# Altium schematic symbol library HEADER.SchLib: 13 symbols
Pins are listed as number, name and electrical type; pins without a type are passive.

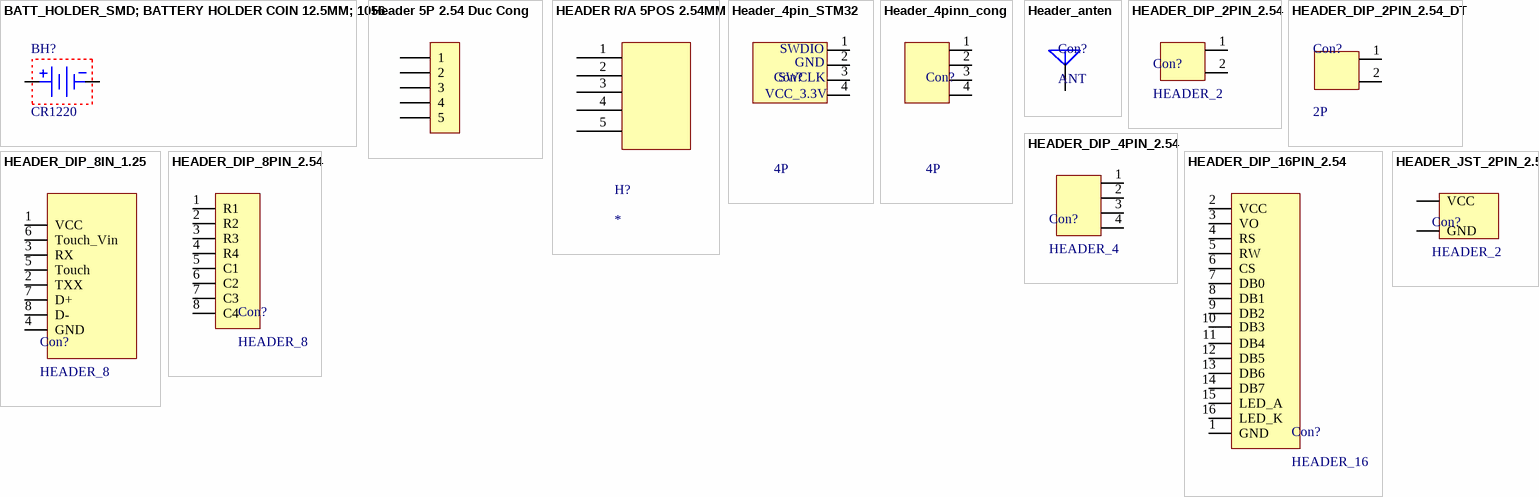
[diagram p0: symbols BATT_HOLDER_SMD; BATTERY HOLDER COIN 12.5MM; 1056 to HEADER_JST_2PIN_2.5]

## BATT_HOLDER_SMD; BATTERY HOLDER COIN 12.5MM; 1056
designator BH?, comment CR1220
Battery Holder, SMT, 1 Coin Cell, 12mm, Plastic, UL94V-0 | Keystone Electronics 1056; Manufacturer Part Number: 1056; Number of Batteries: 1; LIBRARY MADE BY: MR. XUAN SIEU; Supplier 1: DigiKey; Manufacturer: Keystone; RoHS: Compliant; Category: Batteries and Accessories; Stock 1: 79944; Pricing 1: 1=1.1, 1000=0.41, 2500=0.38, 5000=0.35 (USD); Color: Black; Lead Free: Lead Free; Lifecycle Status: Production; Max Operating Temperature: 145°C; Min Operating Temperature: -50°C; Mount: PCB, Surface Mount; Number of Cells: 1; REACH SVHC: Yes; Termination: SMD/SMT; ComponentLink1URL: https://datasheet.octopart.com:443/1056-Keystone-datasheet-15715033.pdf?src-supplier=Future+Electronics; ComponentLink1Description: https://datasheet.octopart.com:443/1056-Keystone-datasheet-15715033.pdf?src-supplier=Future+Electronics; ComponentLink2URL: https://datasheet.octopart.com:443/1056-Keystone-datasheet-8326175.pdf?src-supplier=Future+Electronics; ComponentLink2Description: https://datasheet.octopart.com:443/1056-Keystone-datasheet-8326175.pdf?src-supplier=Future+Electronics; ComponentLink3URL: https://datasheet.octopart.com:443/1056-Keystone-datasheet-137916583.pdf?src-supplier=LKR; ComponentLink3Description: https://datasheet.octopart.com:443/1056-Keystone-datasheet-137916583.pdf?src-supplier=LKR; ComponentLink4URL: https://datasheet.octopart.com:443/1056-Keystone-datasheet-137320296.pdf?src-supplier=Sager+Electronics; ComponentLink4Description: https://datasheet.octopart.com:443/1056-Keystone-datasheet-137320296.pdf?src-supplier=Sager+Electronics; ComponentLink5URL: https://datasheet.octopart.com:443/1056-Keystone-datasheet-62112666.pdf?src-supplier=RS+(Formerly+Allied+Electronics); ComponentLink5Description: https://datasheet.octopart.com:443/1056-Keystone-datasheet-62112666.pdf?src-supplier=RS+(Formerly+Allied+Electronics); ComponentLink6URL: https://datasheet.octopart.com:443/1056-Keystone-datasheet-21202752.pdf?src-supplier=Newark; ComponentLink6Description: https://datasheet.octopart.com:443/1056-Keystone-datasheet-21202752.pdf?src-supplier=Newark; ComponentLink7URL: https://datasheet.octopart.com:443/1056-Keystone-datasheet-17577351.pdf?src-supplier=TME; ComponentLink7Description: https://datasheet.octopart.com:443/1056-Keystone-datasheet-17577351.pdf?src-supplier=TME; ComponentLink8URL: https://datasheet.octopart.com:443/1056-Keystone-datasheet-176783336.pdf?src-supplier=SOS+electronic; ComponentLink8Description: https://datasheet.octopart.com:443/1056-Keystone-datasheet-176783336.pdf?src-supplier=SOS+electronic; Supplier Part Number 1: 36-1056-ND; LINK VIET NAM: https://linhkien.cxtvn.com/1651-de-pin-cr1220-3v-han-dan.html; LINK ORIGINAL: https://www.digikey.com/en/products/detail/keystone-electronics/1056/2020198
footprint BATT_HOLDER_COIL12.5MM
pins: 1 POS, 2 NEG

## Header 5P 2.54 Duc Cong
designator H?
Header 5P XH2.54-5P Đực Cong, MH001308, Cắm; Designer: kata; Link Vietnam: https://linhkienchatluong.vn/urlheader-xh254-chan-duc-cong/header-duc-5p-xh254-5p-chan-cong-10-chiec_sp1782_ct1705.aspx; Link origin: https://www.snapeda.com/parts/S5B-XH-A-LFSN/JST/view-part/?ref=search&t=header%20XH%205p; Datasheet: *
footprint Header 5P DC 2.54
pins: 1, 2, 3, 4, 5

## HEADER R/A 5POS 2.54MM
designator H?
CONN HEADER R/A 5POS 2.54MM; Designer: kata; Link Vietnam: https://linhkienchatluong.vn/urlheader-xh254-chan-duc-cong/header-duc-5p-xh254-5p-chan-cong-10-chiec_sp1782_ct1705.aspx; Link origin: https://www.digikey.vn/en/products/detail/jst-sales-america-inc/S5B-XH-A/1651040; Datasheet: https://www.jst-mfg.com/product/pdf/eng/eXH.pdf
footprint HEADER R/A 5POS 2.54MM (SHEADER R/A 5POS 2.54MM)
pins: 1, 2, 3, 4, 5

## Header_4pin_STM32
designator Con?, comment 4P
Connector Header Through Hole 4 position 0.098" (2.54mm), R/A; Manufacturer Cross: JST; Manufacturer Part Number: B4B-XH-A; Current Rating: 3A; Contact Resistance: 10mR; Insulation Resistance: 1GR; LIBRARY MADE BY: MR. XUAN SIEU; Supplier 1: Digikey; RoHS: Yes; Category: FFC / FPC; Stock 1: 172382; Pricing 1: 1=0.17, 10=0.149, 100=0.1262, 500=0.1126, 1000=0.10721, 5000=0.09569, 10000=0.09112 (USD); Number of Pins: 4; Contact Material: Bronze,Tin; Housing Material: Nylon; Orientation: Straight; Series: XH; ComponentLink1URL: https://datasheet.ciiva.com/14155/xh-series-eng-tds-14155433.pdf?src-supplier=Distrelec; ComponentLink1Description: https://datasheet.ciiva.com/14155/xh-series-eng-tds-14155433.pdf?src-supplier=Distrelec; ComponentLink2Description: Link Original; ComponentLink2URL: https://www.digikey.com/en/products/detail/jst-sales-america-inc/B4B-XH-A/1651047; ComponentLink3Description: Link Cross; ComponentLink3URL: https://www.lcsc.com/product-detail/Wire-To-Board-Connector_JST-B4B-XH-A-G_C594232.html?s_z=n_B4B-XH-A; ComponentLink4Description: Link Viet Nam; ComponentLink4URL: https://linhkien.cxtvn.com/1789-header-duc-254-chan-thang.html; Supplier Part Number 1: 455-B4B-XH-A-ND
footprint HEADER 4P R/A 2.54MM
pins: 1, 2, 3, 4
text: SWDIO; GND; SWCLK; VCC_3.3V

## Header_4pinn_cong
designator Con?, comment 4P
Connector Header Through Hole 4 position 0.098" (2.54mm), R/A; Manufacturer Cross: JST; Manufacturer Part Number: B4B-XH-A; Current Rating: 3A; Contact Resistance: 10mR; Insulation Resistance: 1GR; LIBRARY MADE BY: MR. XUAN SIEU; Supplier 1: Digikey; RoHS: Yes; Category: FFC / FPC; Stock 1: 172382; Pricing 1: 1=0.17, 10=0.149, 100=0.1262, 500=0.1126, 1000=0.10721, 5000=0.09569, 10000=0.09112 (USD); Number of Pins: 4; Contact Material: Bronze,Tin; Housing Material: Nylon; Orientation: Straight; Series: XH; ComponentLink1URL: https://datasheet.ciiva.com/14155/xh-series-eng-tds-14155433.pdf?src-supplier=Distrelec; ComponentLink1Description: https://datasheet.ciiva.com/14155/xh-series-eng-tds-14155433.pdf?src-supplier=Distrelec; ComponentLink2Description: Link Original; ComponentLink2URL: https://www.digikey.com/en/products/detail/jst-sales-america-inc/B4B-XH-A/1651047; ComponentLink3Description: Link Cross; ComponentLink3URL: https://www.lcsc.com/product-detail/Wire-To-Board-Connector_JST-B4B-XH-A-G_C594232.html?s_z=n_B4B-XH-A; ComponentLink4Description: Link Viet Nam; ComponentLink4URL: https://linhkien.cxtvn.com/1789-header-duc-254-chan-thang.html; Supplier Part Number 1: 455-B4B-XH-A-ND
footprint HEADER 4P R/A 2.54MM
pins: 1, 2, 3, 4

## Header_anten
designator Con?, comment ANT
RF / Coaxial Connector, UMCC Coaxial, Straight Jack, Surface Mount Straight, 50 Ohm; Manufacturer: TE Connectivity; Manufacturer Part Number: CONMHF1-SMD-G-T; Manufacturer Lifecycle Status: ACTIVE; Dielectric Material: Liquid Crystal Polymer; Frequency: 6GHz; Gender: Male; Impedance: 50Ω; Insertion Loss (dB): 0.184dB; Number of Positions: 1; MADE BY: HOANGBEU; Supplier: DigiKey; Supplier Part Number: 343-CONMHF1-SMD-G-TTR-ND; RoHS: Compliant; Category: RF / Coaxial Connectors; Stock: 103500; Pricing: 4500=0.3388 (USD); China RoHS: Non-Compliant; Export Control Classification Number (ECCN) Code: EAR99; Fastening Type: Snap; Harmonized Tariff Schedule (HTS) Code: 8536.69.40.10; Introduction Date: 2024-03-20; Lifecycle Status: Production; Max Operating Temperature: 90°C; Min Operating Temperature: -40°C; Orientation: Straight; REACH SVHC: No; ComponentLink1URL: https://datasheet.octopart.com:443/CONMHF1-SMD-G-T-TE-Connectivity-datasheet-175778999.pdf?src-supplier=TE+Connectivity; ComponentLink1Description: https://datasheet.octopart.com:443/CONMHF1-SMD-G-T-TE-Connectivity-datasheet-175778999.pdf?src-supplier=TE+Connectivity; ComponentLink2URL: https://datasheet.octopart.com:443/CONMHF1-SMD-G-T-TE-Connectivity-datasheet-175778996.pdf?src-supplier=TE+Connectivity; ComponentLink2Description: https://datasheet.octopart.com:443/CONMHF1-SMD-G-T-TE-Connectivity-datasheet-175778996.pdf?src-supplier=TE+Connectivity; ComponentLink3URL: https://datasheet.octopart.com:443/CONMHF1-SMD-G-T-TE-Connectivity-datasheet-175778997.pdf?src-supplier=Master+Electronics; ComponentLink3Description: https://datasheet.octopart.com:443/CONMHF1-SMD-G-T-TE-Connectivity-datasheet-175778997.pdf?src-supplier=Master+Electronics; ComponentLink4URL: https://datasheet.octopart.com:443/CONMHF1-SMD-G-T-TE-Connectivity-datasheet-170590134.pdf?src-supplier=Master+Electronics; ComponentLink4Description: https://datasheet.octopart.com:443/CONMHF1-SMD-G-T-TE-Connectivity-datasheet-170590134.pdf?src-supplier=Master+Electronics; ComponentLink5URL: https://datasheet.octopart.com:443/CONMHF1-SMD-G-T-TE-Connectivity---Linx-Technologies-datasheet-178205583.pdf?src-supplier=Master+Electronics; ComponentLink5Description: https://datasheet.octopart.com:443/CONMHF1-SMD-G-T-TE-Connectivity---Linx-Technologies-datasheet-178205583.pdf?src-supplier=Master+Electronics; ComponentLink6URL: https://sigma.octopart.com:443/170590136/technical_drawing/TE-Connectivity-CONMHF1-SMD-G-T.pdf?src-supplier=Future+Electronics; ComponentLink6Description: https://sigma.octopart.com:443/170590136/technical_drawing/TE-Connectivity-CONMHF1-SMD-G-T.pdf?src-supplier=Future+Electronics; ComponentLink7URL: https://datasheet.octopart.com:443/CONMHF1-SMD-G-T-TE-Connectivity-datasheet-179174489.pdf?src-supplier=ODG+(Origin+Data+Global); ComponentLink7Description: https://datasheet.octopart.com:443/CONMHF1-SMD-G-T-TE-Connectivity-datasheet-179174489.pdf?src-supplier=ODG+(Origin+Data+Global); ComponentLink8URL: https://datasheet.octopart.com:443/CONMHF1-SMD-G-T-Linx-Technologies-datasheet-159768554.pdf?src-supplier=TME; ComponentLink8Description: https://datasheet.octopart.com:443/CONMHF1-SMD-G-T-Linx-Technologies-datasheet-159768554.pdf?src-supplier=TME; LINK SP: https://www.digikey.vn/en/products/detail/te-connectivity-linx/CONMHF1-SMD-G-T/15293380?s=N4IgTCBcDaIMIHkByBZAEgMQIwFoDKKAIjgOI4AqIAugL5A; LINK MUA: https://linhkien.cxtvn.com/1647-kk23011-32-7h-de-anten-ipexipx-ufl-r-smt-smd-5c.html
footprint HEADER_ANTEN
pins: 1

## HEADER_DIP_2PIN_2.54
designator Con?, comment HEADER_2
CONN HEADER VERT 2POS 2.54MM / Connector Header Through Hole 2 position 0.100" (2.54mm); Manufacturer: Harwin; Manufacturer Part Number: M20-9990246; Connector Type: Male Pin; Contact Resistance: 30mΩ; Current Rating: 3A; Dielectric Material: Polyamide; Gender: Male; Insulation Resistance: 1GΩ; Number of Contacts: 2; Voltage Rating (AC): 750V; MADE BY: HOANGBEU; Supplier: DigiKey; Supplier Part Number: 952-2262-ND; RoHS: Compliant; Category: Headers and Wire Housings; Stock: 198991; Pricing: 1=0.1, 10=0.079, 100=0.0669, 500=0.0597, 1000=0.05684, 5000=0.05073, 10000=0.04831 (USD); Case/Package: SIL; Color: Black; Contact Material: Brass; Contact Mating Length: 6.096mm; Contact Plating: Tin; Country of Origin: Mainland China; Depth: 2.54mm; Export Control Classification Number (ECCN) Code: EAR99; Height: 8.99mm; Housing Color: Black; Housing Material: Nylon; Harmonized Tariff Schedule (HTS) Code: 8536.69.40.40; Insulation Color: Black; Introduction Date: 2005-06-27; Lead Pitch: 2.54mm; Length: 5.08mm; Lifecycle Status: Production; Max Current Rating: 3A; Max Operating Temperature: 105°C; Min Operating Temperature: -40°C; Mounting Technology: Through Hole; Pins: 2; Number of Positions: 2; Number of Rows: 1; Orientation: Straight; Packaging: Bulk; Pitch: 2.54mm; Radiation Hardening: No; REACH SVHC: Yes; Terminal Pitch: 2.54mm; Termination: Solder; ComponentLink1URL: https://datasheet.octopart.com:443/M20-9990246-Harwin-datasheet-169407857.pdf?src-supplier=Newark; ComponentLink1Description: https://datasheet.octopart.com:443/M20-9990246-Harwin-datasheet-169407857.pdf?src-supplier=Newark; ComponentLink2URL: https://datasheet.octopart.com:443/M20-9990246-Harwin-datasheet-27378916.pdf?src-supplier=Newark; ComponentLink2Description: https://datasheet.octopart.com:443/M20-9990246-Harwin-datasheet-27378916.pdf?src-supplier=Newark; ComponentLink3URL: https://datasheet.octopart.com:443/M20-9990246-Harwin-datasheet-96624206.pdf?src-supplier=element14+APAC; ComponentLink3Description: https://datasheet.octopart.com:443/M20-9990246-Harwin-datasheet-96624206.pdf?src-supplier=element14+APAC; ComponentLink4URL: https://datasheet.octopart.com:443/M20-9990246-Harwin-datasheet-32864541.pdf?src-supplier=Farnell; ComponentLink4Description: https://datasheet.octopart.com:443/M20-9990246-Harwin-datasheet-32864541.pdf?src-supplier=Farnell; ComponentLink5URL: https://datasheet.octopart.com:443/M20-9990246-Harwin-datasheet-7538443.pdf?src-supplier=Farnell; ComponentLink5Description: https://datasheet.octopart.com:443/M20-9990246-Harwin-datasheet-7538443.pdf?src-supplier=Farnell; ComponentLink6URL: https://datasheet.octopart.com:443/M20-9990246-Harwin-datasheet-508868.pdf?src-supplier=Farnell; ComponentLink6Description: https://datasheet.octopart.com:443/M20-9990246-Harwin-datasheet-508868.pdf?src-supplier=Farnell; LINK SP: https://www.digikey.vn/en/products/detail/harwin-inc/M20-9990246/3728226; LINK MUA: https://linhkien.cxtvn.com/5750-0022232021-conn-header-vert-2pos-254mm.html
footprint HEADER_DEIP, 2PIN_2.54 (M20-9990246)
pins: 1, 2

## HEADER_DIP_2PIN_2.54_DT
designator Con?, comment 2P
2.54mm
footprint 2P-2.54mm-DT
pins: 1, 2

## HEADER_DIP_4PIN_2.54
designator Con?, comment HEADER_4
Header, 2.54Mm, Pin, Tht, Vertical, 4Way; |Würth Elektronik 61300411121; Manufacturer: Wurth Elektronik; Manufacturer Lifecycle Status: ACTIVE; Connector Type: Male Pin; Contact Resistance: 20mΩ; Current Rating: 3A; Gender: Male; Insulation Resistance: 1GΩ; Number of Contacts: 4; Operating Supply Voltage: 250V; YEOL: 1 = Estimated lifetime > 10 years; MADE BY: HOANGBEU; Supplier: DigiKey; Supplier Part Number: 732-5317-ND; Manufacturer Part Number: 61300411121; RoHS: Compliant; Category: Headers and Wire Housings; Stock: 108620; Pricing: 1=0.19, 10=0.163, 25=0.1352, 50=0.113, 100=0.102, 1000=0.0986 (USD); Color: Black; Contact Material: Gold; Contact Mating Length: 5.9944mm; Contact Plating: Gold; Height: 8.89mm; Lead Free: Lead Free; Lead Pitch: 2.54mm; Length: 10.16mm; Lifecycle Status: Production; Max Operating Temperature: 105°C; Min Operating Temperature: -40°C; Mounting Technology: Through Hole; Pins: 4; Number of Positions: 4; Number of Rows: 1; Orientation: Vertical; Packaging: Bulk; Pitch: 2.54mm; Termination: Solder; Voltage Rating: 250V; ComponentLink1URL: https://datasheet.octopart.com:443/61300411121-W%C3%BCrth-Elektronik-datasheet-44382959.pdf?src-supplier=Future+Electronics; ComponentLink1Description: https://datasheet.octopart.com:443/61300411121-W%C3%BCrth-Elektronik-datasheet-44382959.pdf?src-supplier=Future+Electronics; ComponentLink2URL: https://datasheet.octopart.com:443/61300411121-Wurth-Elektronik-datasheet-169474491.pdf?src-supplier=Wurth+Elektronik; ComponentLink2Description: https://datasheet.octopart.com:443/61300411121-Wurth-Elektronik-datasheet-169474491.pdf?src-supplier=Wurth+Elektronik; ComponentLink3URL: https://datasheet.octopart.com:443/61300411121-W%C3%BCrth-Elektronik-datasheet-149524049.pdf?src-supplier=Farnell; ComponentLink3Description: https://datasheet.octopart.com:443/61300411121-W%C3%BCrth-Elektronik-datasheet-149524049.pdf?src-supplier=Farnell; ComponentLink4URL: https://datasheet.octopart.com:443/61300411121-W%C3%BCrth-Elektronik-datasheet-21154836.pdf?src-supplier=element14+APAC; ComponentLink4Description: https://datasheet.octopart.com:443/61300411121-W%C3%BCrth-Elektronik-datasheet-21154836.pdf?src-supplier=element14+APAC; LINK SP: https://www.digikey.vn/en/products/detail/w%C3%BCrth-elektronik/61300411121/4846827; LINK MUA: https://linhkien.cxtvn.com/11072-conn-header-vert-254mm.html
footprint HEADER_DIP_4PIN_2.54
pins: 1, 2, 3, 4

## HEADER_DIP_8IN_1.25
designator Con?, comment HEADER_8
Conn Shrouded Header (4 Sides) HDR 8 POS 1.25mm Solder ST Top Entry Thru-Hole PicoBlade Tray; Manufacturer: Molex; Manufacturer Part Number: 53047-0810; Manufacturer Lifecycle Status: ACTIVE; Contact Resistance: 20mΩ; Current Rating: 1A; Dielectric Material: Polyamide; Gender: Male; Glow Wire Compliant: Non-compliant; Insulation Resistance: 100MΩ; Number of Circuits: 7; Number of Contacts: 8; Pitch: 1.2446mm; Plating: Tin; Voltage Rating: 125V; MADE BY: HOANGBEU; Supplier: DigiKey; Supplier Part Number: WM1737-ND; RoHS: Compliant; Category: Headers and Wire Housings; Stock: 23793; Pricing: 1=0.49, 10=0.412, 100=0.35, 500=0.31236, 2000=0.28324, 6000=0.26211, 10000=0.25283 (USD); Case/Package: 0810; China RoHS: Compliant; Color: Natural; Contact Material: Tin; Contact Plating: Tin; Country of Origin: MX; Export Control Classification Number (ECCN) Code: EAR99; Flammability Rating: UL94 V-0; Height: 4.4mm; Housing Color: Natural; Housing Material: Polyamide; Harmonized Tariff Schedule (HTS) Code: 8536.69.40.40; Insulation Color: White; Introduction Date: 1994-12-01; Lead Free: Lead Free; Lead Pitch: 1.25mm; Lifecycle Status: Production; Max Operating Temperature: 85°C; Min Operating Temperature: -40°C; Mounting Technology: Through Hole; Pins: 8; Number of Positions: 8; Number of Rows: 1; Orientation: Vertical; Radiation Hardening: No; REACH SVHC: Yes; Schedule B: 8536694040, 8536694040|8536694040|8536694040|8536694040|8536694040; Terminal Pitch: 1.25mm; Termination: Solder; Voltage Rating (AC): 125V; Voltage Rating (DC): 125V; ComponentLink1URL: https://datasheet.octopart.com:443/53047-0810-Molex-datasheet-138898128.pdf?src-supplier=Sager+Electronics; ComponentLink1Description: https://datasheet.octopart.com:443/53047-0810-Molex-datasheet-138898128.pdf?src-supplier=Sager+Electronics; ComponentLink2URL: https://datasheet.octopart.com:443/53047-0810-Molex-datasheet-13785974.pdf?src-supplier=Sager+Electronics; ComponentLink2Description: https://datasheet.octopart.com:443/53047-0810-Molex-datasheet-13785974.pdf?src-supplier=Sager+Electronics; ComponentLink3URL: https://sigma.octopart.com:443/138898116/technical_drawing/Molex-53047-0810.pdf?src-supplier=IHS; ComponentLink3Description: https://sigma.octopart.com:443/138898116/technical_drawing/Molex-53047-0810.pdf?src-supplier=IHS; ComponentLink4URL: https://datasheet.octopart.com:443/530470810-Molex-datasheet-8334299.pdf?src-supplier=Molex; ComponentLink4Description: https://datasheet.octopart.com:443/530470810-Molex-datasheet-8334299.pdf?src-supplier=Molex; ComponentLink5URL: https://datasheet.octopart.com:443/53047-0810-Molex-datasheet-38191.pdf?src-supplier=TME; ComponentLink5Description: https://datasheet.octopart.com:443/53047-0810-Molex-datasheet-38191.pdf?src-supplier=TME; ComponentLink6URL: https://datasheet.octopart.com:443/53047-0810-Molex-datasheet-154755961.pdf?src-supplier=Master+Electronics; ComponentLink6Description: https://datasheet.octopart.com:443/53047-0810-Molex-datasheet-154755961.pdf?src-supplier=Master+Electronics; ComponentLink7URL: https://datasheet.octopart.com:443/53047-0810-Molex-datasheet-101583379.pdf?src-supplier=Farnell; ComponentLink7Description: https://datasheet.octopart.com:443/53047-0810-Molex-datasheet-101583379.pdf?src-supplier=Farnell; ComponentLink8URL: https://datasheet.octopart.com:443/53047-0810-Molex-datasheet-14711287.pdf?src-supplier=Farnell; ComponentLink8Description: https://datasheet.octopart.com:443/53047-0810-Molex-datasheet-14711287.pdf?src-supplier=Farnell; ComponentLink9URL: https://datasheet.octopart.com:443/53047-0810-Molex-datasheet-5313088.pdf?src-supplier=Farnell; ComponentLink9Description: https://datasheet.octopart.com:443/53047-0810-Molex-datasheet-5313088.pdf?src-supplier=Farnell; ComponentLink10URL: https://datasheet.octopart.com:443/53047-0810-Molex-datasheet-33003857.pdf?src-supplier=Electro+Sonic; ComponentLink10Description: https://datasheet.octopart.com:443/53047-0810-Molex-datasheet-33003857.pdf?src-supplier=Electro+Sonic; ComponentLink11URL: https://datasheet.octopart.com:443/53047-0810-Molex-datasheet-62105410.pdf?src-supplier=Electro+Sonic; ComponentLink11Description: https://datasheet.octopart.com:443/53047-0810-Molex-datasheet-62105410.pdf?src-supplier=Electro+Sonic; ComponentLink12URL: https://datasheet.octopart.com:443/53047-0810-Molex-datasheet-23710544.pdf?src-supplier=Electro+Sonic; ComponentLink12Description: https://datasheet.octopart.com:443/53047-0810-Molex-datasheet-23710544.pdf?src-supplier=Electro+Sonic; ComponentLink13URL: https://datasheet.octopart.com:443/53047-0810-Molex-datasheet-140186535.pdf?src-supplier=RS+(Formerly+Allied+Electronics); ComponentLink13Description: https://datasheet.octopart.com:443/53047-0810-Molex-datasheet-140186535.pdf?src-supplier=RS+(Formerly+Allied+Electronics); ComponentLink14URL: https://datasheet.octopart.com:443/53047-0810-Molex-datasheet-120153815.pdf?src-supplier=RS+(Formerly+Allied+Electronics); ComponentLink14Description: https://datasheet.octopart.com:443/53047-0810-Molex-datasheet-120153815.pdf?src-supplier=RS+(Formerly+Allied+Electronics); ComponentLink15URL: https://datasheet.octopart.com:443/530470810-Molex-datasheet-137316104.pdf?src-supplier=Future+Electronics; ComponentLink15Description: https://datasheet.octopart.com:443/530470810-Molex-datasheet-137316104.pdf?src-supplier=Future+Electronics; ComponentLink16URL: https://datasheet.octopart.com:443/53047-0810-Molex-datasheet-33003856.pdf?src-supplier=Newark; ComponentLink16Description: https://datasheet.octopart.com:443/53047-0810-Molex-datasheet-33003856.pdf?src-supplier=Newark; ComponentLink17URL: https://datasheet.octopart.com:443/53047-0810-Molex-datasheet-21208624.pdf?src-supplier=Newark; ComponentLink17Description: https://datasheet.octopart.com:443/53047-0810-Molex-datasheet-21208624.pdf?src-supplier=Newark; ComponentLink18URL: https://datasheet.octopart.com:443/53047-0810-Molex-datasheet-17741837.pdf?src-supplier=Jameco+(USA); ComponentLink18Description: https://datasheet.octopart.com:443/53047-0810-Molex-datasheet-17741837.pdf?src-supplier=Jameco+(USA); ComponentLink19URL: https://datasheet.octopart.com:443/53047-0810-Molex-datasheet-144844.pdf?src-supplier=DigiKey; ComponentLink19Description: https://datasheet.octopart.com:443/53047-0810-Molex-datasheet-144844.pdf?src-supplier=DigiKey; ComponentLink20URL: https://datasheet.octopart.com:443/53047-0810-Molex-datasheet-100429.pdf?src-supplier=Mouser; ComponentLink20Description: https://datasheet.octopart.com:443/53047-0810-Molex-datasheet-100429.pdf?src-supplier=Mouser; ComponentLink21URL: http://sigma.octopart.com:80/16412934/rohs_statement/Molex-53047-0810.pdf?src-supplier=Compliance+Statements; ComponentLink21Description: http://sigma.octopart.com:80/16412934/rohs_statement/Molex-53047-0810.pdf?src-supplier=Compliance+Statements; ComponentLink22URL: http://sigma.octopart.com:80/reach_statement/Molex-company-74.pdf?src-supplier=Compliance+Statements; ComponentLink22Description: http://sigma.octopart.com:80/reach_statement/Molex-company-74.pdf?src-supplier=Compliance+Statements; ComponentLink23URL: http://sigma.octopart.com:80/rohs_statement/Molex-company-73.pdf?src-supplier=Compliance+Statements; ComponentLink23Description: http://sigma.octopart.com:80/rohs_statement/Molex-company-73.pdf?src-supplier=Compliance+Statements; ComponentLink24URL: http://sigma.octopart.com:80/conflict_mineral_statement/Molex-company-72.pdf?src-supplier=Compliance+Statements; ComponentLink24Description: http://sigma.octopart.com:80/conflict_mineral_statement/Molex-company-72.pdf?src-supplier=Compliance+Statements; LINK SP: https://www.digikey.vn/en/products/detail/molex/0530470810/242859; LINK MUA: https://linhkien.cxtvn.com/10705-header-duc-smd-125mm-8p-10c.html
footprint HEADER_DIP_8PIN_1.25
pins: 1 VCC, 2 TXX, 3 RX, 4 GND, 5 Touch, 6 Touch_Vin, 7 D+, 8 D-

## HEADER_DIP_8PIN_2.54
designator Con?, comment HEADER_8
Pin Header, Wire-to-Board, 2.54 mm, 1 Rows, 8 Contacts, Through Hole Straight, MTA-100 Series; Manufacturer: TE Connectivity; Manufacturer Part Number: 640456-8; Manufacturer Lifecycle Status: ACTIVE; Circuit Application: Signal; Contact Current Rating: 5A; Gender: Male; Mating Retention: With; Number of Contacts: 8; Number of Ports: 1; Operating Supply Voltage: 250V; PCB Mount Alignment: Without; Pitch: 2.54mm; Plating: Tin; Plating Thickness: 3.81µm; Ratings: CSA; Sealable: No; Shielding: Unshielded; MADE BY: HOANGBEU; Supplier: DigiKey; Supplier Part Number: A1924-ND; RoHS: Compliant; Category: Headers and Wire Housings; Stock: 27083; Pricing: 1=0.44, 10=0.373, 100=0.317, 500=0.2829, 1000=0.26938, 5000=0.24045, 10000=0.22898 (USD); China RoHS: Compliant; Color: White; Connector System: Wire-to-Board; Contact Finish Thickness - Mating: 3.81µm; Contact Material: Tin; Contact Plating: Tin; Contact Style: Pin; Current Rating: 5A; Export Control Classification Number (ECCN) Code: EAR99; Height: 10mm; Housing Color: Natural; Housing Material: Polyester; Harmonized Tariff Schedule (HTS) Code: 8536.69.40.40; Lead Free: Lead Free; Lead Pitch: 2.54mm; Length: 22.86mm; Lifecycle Status: Production; Max Operating Temperature: 105°C; Min Operating Temperature: -55°C; Pins: 6; Number of Positions: 8; Number of Rows: 1; Orientation: Vertical; Packaging: Bulk; PCB Mount Retention: Without; REACH SVHC: Yes; Shrouded: No; Terminal Pitch: 2.54mm; Termination: Solder; Voltage Rating: 250V; Voltage Rating (AC): 250V; Voltage Rating (DC): 250V; Width: 10mm; ComponentLink1URL: https://datasheet.octopart.com:443/640456-8-TE-Connectivity-datasheet-180143887.pdf?src-supplier=JRH+Electronics; ComponentLink1Description: https://datasheet.octopart.com:443/640456-8-TE-Connectivity-datasheet-180143887.pdf?src-supplier=JRH+Electronics; ComponentLink2URL: https://datasheet.octopart.com:443/640456-8-TE-Connectivity---AMP-datasheet-193348088.pdf?src-supplier=JRH+Electronics; ComponentLink2Description: https://datasheet.octopart.com:443/640456-8-TE-Connectivity---AMP-datasheet-193348088.pdf?src-supplier=JRH+Electronics; ComponentLink3URL: https://datasheet.octopart.com:443/640456-8-TE-Connectivity-datasheet-134307431.pdf?src-supplier=Sager+Electronics; ComponentLink3Description: https://datasheet.octopart.com:443/640456-8-TE-Connectivity-datasheet-134307431.pdf?src-supplier=Sager+Electronics; ComponentLink4URL: https://sigma.octopart.com:443/77881742/technical_drawing/TE-Connectivity-640456-8.pdf?src-supplier=Sager+Electronics; ComponentLink4Description: https://sigma.octopart.com:443/77881742/technical_drawing/TE-Connectivity-640456-8.pdf?src-supplier=Sager+Electronics; ComponentLink5URL: https://sigma.octopart.com:443/12138122/technical_drawing/TE-Connectivity-640456-8.pdf?src-supplier=TE+Connectivity; ComponentLink5Description: https://sigma.octopart.com:443/12138122/technical_drawing/TE-Connectivity-640456-8.pdf?src-supplier=TE+Connectivity; ComponentLink6URL: https://datasheet.octopart.com:443/640456-8-TE-Connectivity---AMP-datasheet-181445315.pdf?src-supplier=IHS; ComponentLink6Description: https://datasheet.octopart.com:443/640456-8-TE-Connectivity---AMP-datasheet-181445315.pdf?src-supplier=IHS; ComponentLink7URL: https://datasheet.octopart.com:443/640456-8-TE-Connectivity-datasheet-55593121.pdf?src-supplier=Master+Electronics; ComponentLink7Description: https://datasheet.octopart.com:443/640456-8-TE-Connectivity-datasheet-55593121.pdf?src-supplier=Master+Electronics; ComponentLink8URL: https://datasheet.octopart.com:443/640456-8-TE-Connectivity-datasheet-62056020.pdf?src-supplier=Newark; ComponentLink8Description: https://datasheet.octopart.com:443/640456-8-TE-Connectivity-datasheet-62056020.pdf?src-supplier=Newark; ComponentLink9URL: https://datasheet.octopart.com:443/640456-8-TE-Connectivity-datasheet-34200986.pdf?src-supplier=Newark; ComponentLink9Description: https://datasheet.octopart.com:443/640456-8-TE-Connectivity-datasheet-34200986.pdf?src-supplier=Newark; ComponentLink10URL: https://datasheet.octopart.com:443/640456-8-TE-Connectivity-datasheet-11111.pdf?src-supplier=TME; ComponentLink10Description: https://datasheet.octopart.com:443/640456-8-TE-Connectivity-datasheet-11111.pdf?src-supplier=TME; ComponentLink11URL: https://datasheet.octopart.com:443/640456-8-AMP-datasheet-176972493.pdf?src-supplier=Burklin+Elektronik; ComponentLink11Description: https://datasheet.octopart.com:443/640456-8-AMP-datasheet-176972493.pdf?src-supplier=Burklin+Elektronik; ComponentLink12URL: https://datasheet.octopart.com:443/640456-8-AMP-datasheet-165057232.pdf?src-supplier=Burklin+Elektronik; ComponentLink12Description: https://datasheet.octopart.com:443/640456-8-AMP-datasheet-165057232.pdf?src-supplier=Burklin+Elektronik; ComponentLink13URL: https://datasheet.octopart.com:443/640456-8-TE-Connectivity---AMP-datasheet-37174084.pdf?src-supplier=Electro+Sonic; ComponentLink13Description: https://datasheet.octopart.com:443/640456-8-TE-Connectivity---AMP-datasheet-37174084.pdf?src-supplier=Electro+Sonic; ComponentLink14URL: https://datasheet.octopart.com:443/640456-8-TE-Connectivity---AMP-datasheet-27852660.pdf?src-supplier=Electro+Sonic; ComponentLink14Description: https://datasheet.octopart.com:443/640456-8-TE-Connectivity---AMP-datasheet-27852660.pdf?src-supplier=Electro+Sonic; ComponentLink15URL: https://datasheet.octopart.com:443/640456-8-TE-Connectivity-datasheet-62113222.pdf?src-supplier=RS+(Formerly+Allied+Electronics); ComponentLink15Description: https://datasheet.octopart.com:443/640456-8-TE-Connectivity-datasheet-62113222.pdf?src-supplier=RS+(Formerly+Allied+Electronics); ComponentLink16URL: https://datasheet.octopart.com:443/640456-8-TE-Connectivity-datasheet-20739187.pdf?src-supplier=RS+(Formerly+Allied+Electronics); ComponentLink16Description: https://datasheet.octopart.com:443/640456-8-TE-Connectivity-datasheet-20739187.pdf?src-supplier=RS+(Formerly+Allied+Electronics); ComponentLink17URL: https://datasheet.octopart.com:443/640456-8-Tyco-Electronics-datasheet-9920076.pdf?src-supplier=RS+(Formerly+Allied+Electronics); ComponentLink17Description: https://datasheet.octopart.com:443/640456-8-Tyco-Electronics-datasheet-9920076.pdf?src-supplier=RS+(Formerly+Allied+Electronics); ComponentLink18URL: https://datasheet.octopart.com:443/640456-8-Tyco-Electronics-datasheet-93495.pdf?src-supplier=RS+(Formerly+Allied+Electronics); ComponentLink18Description: https://datasheet.octopart.com:443/640456-8-Tyco-Electronics-datasheet-93495.pdf?src-supplier=RS+(Formerly+Allied+Electronics); ComponentLink19URL: https://datasheet.octopart.com:443/640456-8-Agastat-datasheet-14718767.pdf?src-supplier=Farnell; ComponentLink19Description: https://datasheet.octopart.com:443/640456-8-Agastat-datasheet-14718767.pdf?src-supplier=Farnell; ComponentLink20URL: https://datasheet.octopart.com:443/640456-8-TE-Connectivity-datasheet-12524584.pdf?src-supplier=Future+Electronics; ComponentLink20Description: https://datasheet.octopart.com:443/640456-8-TE-Connectivity-datasheet-12524584.pdf?src-supplier=Future+Electronics; ComponentLink21URL: https://datasheet.octopart.com:443/640456-8-TE-Connectivity-datasheet-10410195.pdf?src-supplier=Jameco+(USA); ComponentLink21Description: https://datasheet.octopart.com:443/640456-8-TE-Connectivity-datasheet-10410195.pdf?src-supplier=Jameco+(USA); ComponentLink22URL: http://sigma.octopart.com:80/38865345/materials_sheet/TE-Connectivity-640456-8.pdf?src-supplier=Compliance+Statements; ComponentLink22Description: http://sigma.octopart.com:80/38865345/materials_sheet/TE-Connectivity-640456-8.pdf?src-supplier=Compliance+Statements; ComponentLink23URL: http://sigma.octopart.com:80/78325978/materials_sheet/TE-Connectivity-640456-8.pdf?src-supplier=Compliance+Statements; ComponentLink23Description: http://sigma.octopart.com:80/78325978/materials_sheet/TE-Connectivity-640456-8.pdf?src-supplier=Compliance+Statements; ComponentLink24URL: http://sigma.octopart.com:80/14808631/rohs_certificate/Agastat-640456-8.pdf?src-supplier=Compliance+Statements; ComponentLink24Description: http://sigma.octopart.com:80/14808631/rohs_certificate/Agastat-640456-8.pdf?src-supplier=Compliance+Statements; LINK SP: https://www.digikey.vn/en/products/detail/te-connectivity-amp-connectors/640456-8/109011; LINK MUA: https://linhkienchatluong.vn/urlheader-xh254-chan-duc-thang/header-duc-8p-xh254-8p-chan-thang-10c_sp1781_ct1717.aspx
footprint HEADER_DIP_8PIN_2.54
pins: 1 R1, 2 R2, 3 R3, 4 R4, 5 C1, 6 C2, 7 C3, 8 C4

## HEADER_DIP_16PIN_2.54
designator Con?, comment HEADER_16
WR-PHD Straight Male, PCB Header, Through Hole, 1 Rows, 16 Contacts, 2.54mm Pitch; Manufacturer: Wurth Elektronik; Manufacturer Part Number: 61301611121; Manufacturer Lifecycle Status: ACTIVE; Connector Type: Male Pin; Contact Resistance: 20mΩ; Current Rating: 3A; Insulation Resistance: 1GΩ; Number of Contacts: 16; Operating Supply Voltage: 250V; YEOL: 1 = Estimated lifetime > 10 years; MADE BY: HOANGBEU; Supplier: DigiKey; Supplier Part Number: 732-5327-ND; RoHS: Compliant; Category: Headers and Wire Housings; Stock: 11136; Pricing: 1=0.91, 10=0.776, 25=0.6468, 50=0.5396, 100=0.493 (USD); Color: Black; Contact Material: Gold; Contact Mating Length: 5.9944mm; Contact Plating: Gold; Gender: Male; Height: 8.89mm; Lead Pitch: 2.54mm; Length: 40.64mm; Lifecycle Status: Production; Max Operating Temperature: 105°C; Min Operating Temperature: -40°C; Mounting Technology: Through Hole; Pins: 16; Number of Positions: 16; Number of Rows: 1; Orientation: Vertical; Packaging: Bulk; Pitch: 2.54mm; Termination: Solder; Voltage Rating: 250V; ComponentLink1URL: https://datasheet.octopart.com:443/61301611121-Wurth-Elektronik-datasheet-181533315.pdf?src-supplier=Wurth+Elektronik; ComponentLink1Description: https://datasheet.octopart.com:443/61301611121-Wurth-Elektronik-datasheet-181533315.pdf?src-supplier=Wurth+Elektronik; ComponentLink2URL: https://datasheet.octopart.com:443/61301611121-W%C3%BCrth-Elektronik-datasheet-134615323.pdf?src-supplier=Upverter; ComponentLink2Description: https://datasheet.octopart.com:443/61301611121-W%C3%BCrth-Elektronik-datasheet-134615323.pdf?src-supplier=Upverter; ComponentLink3URL: https://datasheet.octopart.com:443/61301611121-W%C3%BCrth-Elektronik-datasheet-44382959.pdf?src-supplier=HQonline; ComponentLink3Description: https://datasheet.octopart.com:443/61301611121-W%C3%BCrth-Elektronik-datasheet-44382959.pdf?src-supplier=HQonline; ComponentLink4URL: https://datasheet.octopart.com:443/61301611121-W%C3%BCrth-Elektronik-datasheet-149524161.pdf?src-supplier=Farnell; ComponentLink4Description: https://datasheet.octopart.com:443/61301611121-W%C3%BCrth-Elektronik-datasheet-149524161.pdf?src-supplier=Farnell; ComponentLink5URL: https://datasheet.octopart.com:443/61301611121-W%C3%BCrth-Elektronik-datasheet-21154836.pdf?src-supplier=element14+APAC; ComponentLink5Description: https://datasheet.octopart.com:443/61301611121-W%C3%BCrth-Elektronik-datasheet-21154836.pdf?src-supplier=element14+APAC; LINK SP: https://www.digikey.vn/en/products/detail/w%C3%BCrth-elektronik/61301611121/4846854?s=N4IgTCBcDaIGwEYDMAGBiELAkBdAvkA; LINK MUA: https://linhkien.cxtvn.com/6259-0878341619-conn-header-vert-16pos-254mm.html
footprint HEADER_DIP, 16PIN_2.54 (61301611121)
pins: 1 GND, 2 VCC, 3 VO, 4 RS, 5 RW, 6 CS, 7 DB0, 8 DB1, 9 DB2, 10 DB3, 11 DB4, 12 DB5, 13 DB6, 14 DB7, 15 LED_A, 16 LED_K

## HEADER_JST_2PIN_2.5
designator Con?, comment HEADER_2
CONN HEADER VERT 2POS 2.5MM / Connector Header Through Hole 2 position 0.098" (2.50mm); Manufacturer: JST; Manufacturer Part Number: B2B-EH-A; Connector Type: Male Pin; Gender: Male; Number of Contacts: 2; Pitch: 2.4892mm; MADE BY: HOANGBEU; Supplier: DigiKey; Supplier Part Number: 455-B2B-EH-A-ND; RoHS: Compliant; Category: Headers and Wire Housings; Stock: 74231; Pricing: 1=0.1, 10=0.082, 100=0.0696, 500=0.06208, 1000=0.05911, 5000=0.05276, 10000=0.05024 (USD); Color: Natural; Contact Material: Brass; Contact Mating Length: 3.302mm; Contact Plating: Lead, Tin; Export Control Classification Number (ECCN) Code: EAR99; Fastening Type: Detent; Housing Color: White; Housing Material: Nylon; Harmonized Tariff Schedule (HTS) Code: 8536.69.40.40; Introduction Date: 1996-12-01; Lead Free: Contains Lead; Lead Pitch: 2.5mm; Lifecycle Status: Production; Mounting Technology: Through Hole; Pins: 2; Number of Positions: 2; Number of Rows: 1; Orientation: Straight; Packaging: Bulk; Terminal Pitch: 2.5mm; Termination: Solder; ComponentLink1URL: https://datasheet.octopart.com:443/B2B-EH-A-JST-datasheet-25362627.pdf?src-supplier=IHS; ComponentLink1Description: https://datasheet.octopart.com:443/B2B-EH-A-JST-datasheet-25362627.pdf?src-supplier=IHS; ComponentLink2URL: https://datasheet.octopart.com:443/B2B-EH-A-JST-datasheet-122365.pdf?src-supplier=DigiKey; ComponentLink2Description: https://datasheet.octopart.com:443/B2B-EH-A-JST-datasheet-122365.pdf?src-supplier=DigiKey; LINK SP: https://www.digikey.com/en/products/detail/jst-sales-america-inc/B2B-EH-A/926520; LINK MUA: https://linhkien.cxtvn.com/4971-b2b-eh-alfsn-connector-header-vert-2pos-25mm.html
footprint HEADER_JST, 2pin
pins: 1 VCC, 2 GND